# Altium footprint library 730962.PcbLib: 1 footprints
Each footprint in its own frame and in the unit in brackets; x right, y up, seen from the top. Pads: shape width x height; smd on the part's side, far side on the other; paste and mask are expansions set on the pad; w line width, h text height; cw(c..) or ccw(c..) is an arc to the next point about the centre after c.
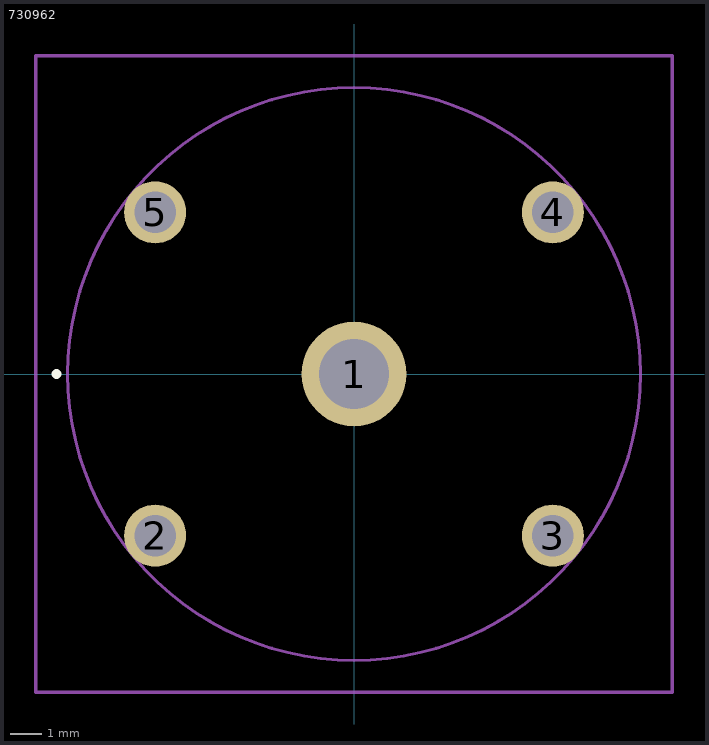
[diagram p0: the footprint, top view; thin cyan lines are the x and y axes]

## 730962 [mm]
pads (5):
  round 3.3 hole 2.2: 1(0,0)
  round 1.95 hole 1.3: 2(-6.25,-5.08) 3(6.25,-5.08) 4(6.25,5.08) 5(-6.25,5.08)
Top Overlay:
  lines w0.2: -9.4,0 ccw(c-9.35,0) -9.3,0 ; -9.4,0 cw(c-9.35,0) -9.3,0 ; -9.4,0 ccw(c-9.35,0) -9.3,0
Mechanical 15:
  lines w0.1: -9,0 cw(c0,0) 9,0 cw(c0,0) -9,0
Mechanical 20:
  lines w0.1: -10,-10 -10,10 10,10 10,-10 -10,-10
3D body "73096-2.stp": height 27.43, standoff -2.54, extent -9.004,-9.009 9.004,8.991